# Altium footprint library FH1222S05SVA54.PcbLib: 1 footprints
Each footprint in its own frame and in the unit in brackets; x right, y up, seen from the top. Pads: shape width x height; smd on the part's side, far side on the other; paste and mask are expansions set on the pad; w line width, h text height; cw(c..) or ccw(c..) is an arc to the next point about the centre after c.
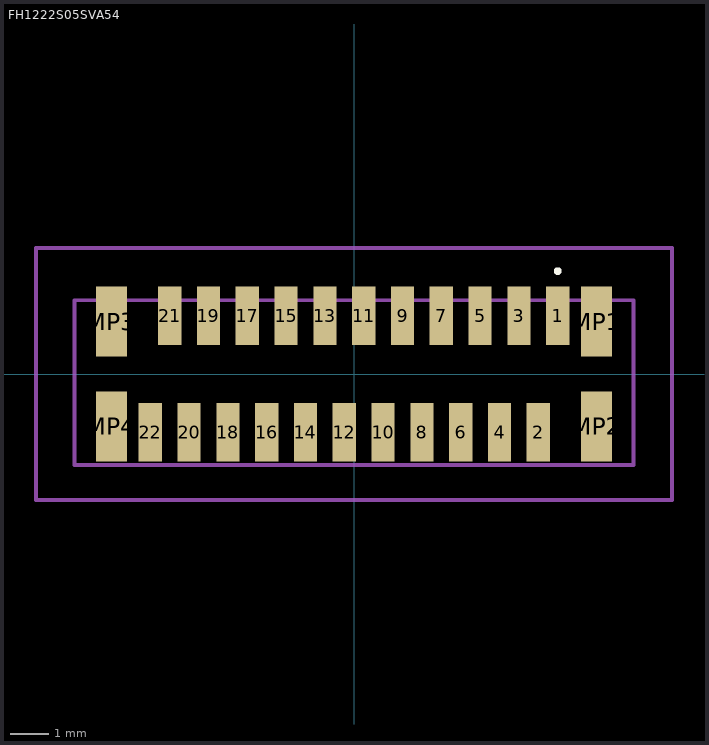
[diagram p0: the footprint, top view; thin cyan lines are the x and y axes]

## FH1222S05SVA54 [mm]
pads (26):
  rect 0.6x1.5 smd: 1(5.25,1.5) 2(4.75,-1.5) 3(4.25,1.5) 4(3.75,-1.5) 5(3.25,1.5) 6(2.75,-1.5) 7(2.25,1.5) 8(1.75,-1.5) 9(1.25,1.5) 10(0.75,-1.5) 11(0.25,1.5) 12(-0.25,-1.5) 13(-0.75,1.5) 14(-1.25,-1.5) 15(-1.75,1.5) 16(-2.25,-1.5) 17(-2.75,1.5) 18(-3.25,-1.5) 19(-3.75,1.5) 20(-4.25,-1.5) 21(-4.75,1.5) 22(-5.25,-1.5)
  rect 0.8x1.8 smd: MP1(6.25,1.35) MP2(6.25,-1.35) MP3(-6.25,1.35) MP4(-6.25,-1.35)
Top Overlay:
  lines w0.1: 5.25,2.6 5.25,2.6 ; 5.25,2.6 ccw(c5.25,2.65) 5.25,2.7 ; 5.25,2.6 cw(c5.25,2.65) 5.25,2.7 ; 5.25,2.7 5.25,2.7
Mechanical 15:
  lines w0.1: -7.2,-2.35 7.2,-2.35 7.2,1.9 -7.2,1.9 -7.2,-2.35
Mechanical 20:
  lines w0.1: -8.2,-3.25 8.2,-3.25 8.2,3.25 -8.2,3.25 -8.2,-3.25